# Altium schematic symbol library ARJM11C7-009-AB-EW2.SchLib: 1 symbol
Pins are listed as number, name and electrical type; pins without a type are passive.

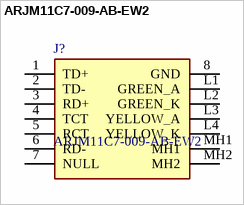
[diagram p0: symbol ARJM11C7-009-AB-EW2]

## ARJM11C7-009-AB-EW2
designator J?
Conn RJ-45 F 8 POS 1.27mm Solder RA Thru-Hole 12 Terminal 1 Port Tray; Manufacturer_Name: ABRACON; Geometry.Height: 15.3mm; Mouser Part Number: 815-RJM11C7009ABEW2; Mouser Price/Stock: https://www.mouser.co.uk/ProductDetail/ABRACON/ARJM11C7-009-AB-EW2?qs=YCa%2FAAYMW016No73G%2F4GTg%3D%3D; Manufacturer_Part_Number: ARJM11C7-009-AB-EW2; Datasheet Link: https://datasheet.datasheetarchive.com/originals/dk/DKDS41/DSANUWW0031023.pdf
footprint ARJM11C7009ABEW2
pins: 1 TD+, 2 TD-, 3 RD+, 4 TCT, 5 RCT, 6 RD-, 7 NULL, 8 GND, L1 GREEN_A, L2 GREEN_K, L3 YELLOW_A, L4 YELLOW_K, MH1, MH2